# Altium integrated library SFH_300_FA.IntLib: 1 symbol
Pins are listed as number, name and electrical type; pins without a type are passive.

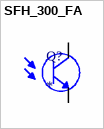
[diagram p0: symbol SFH_300_FA]

## SFH_300_FA
designator Q?
Phototransistor IR Chip Silicon 880nm 2-Pin T-1 3/4; MP: SFH_300_FA; Package: None; Price: None; Value: *; Availability: Unavailable
footprint XDCR_SFH_300_FA
pins: 1 E, 2 C